# Altium footprint library Amin-Library.PcbLib: 601 footprints (part 21 of 38)
Each footprint in its own frame and in the unit in brackets; x right, y up, seen from the top. Pads: shape width x height; smd on the part's side, far side on the other; paste and mask are expansions set on the pad; w line width, h text height; cw(c..) or ccw(c..) is an arc to the next point about the centre after c.
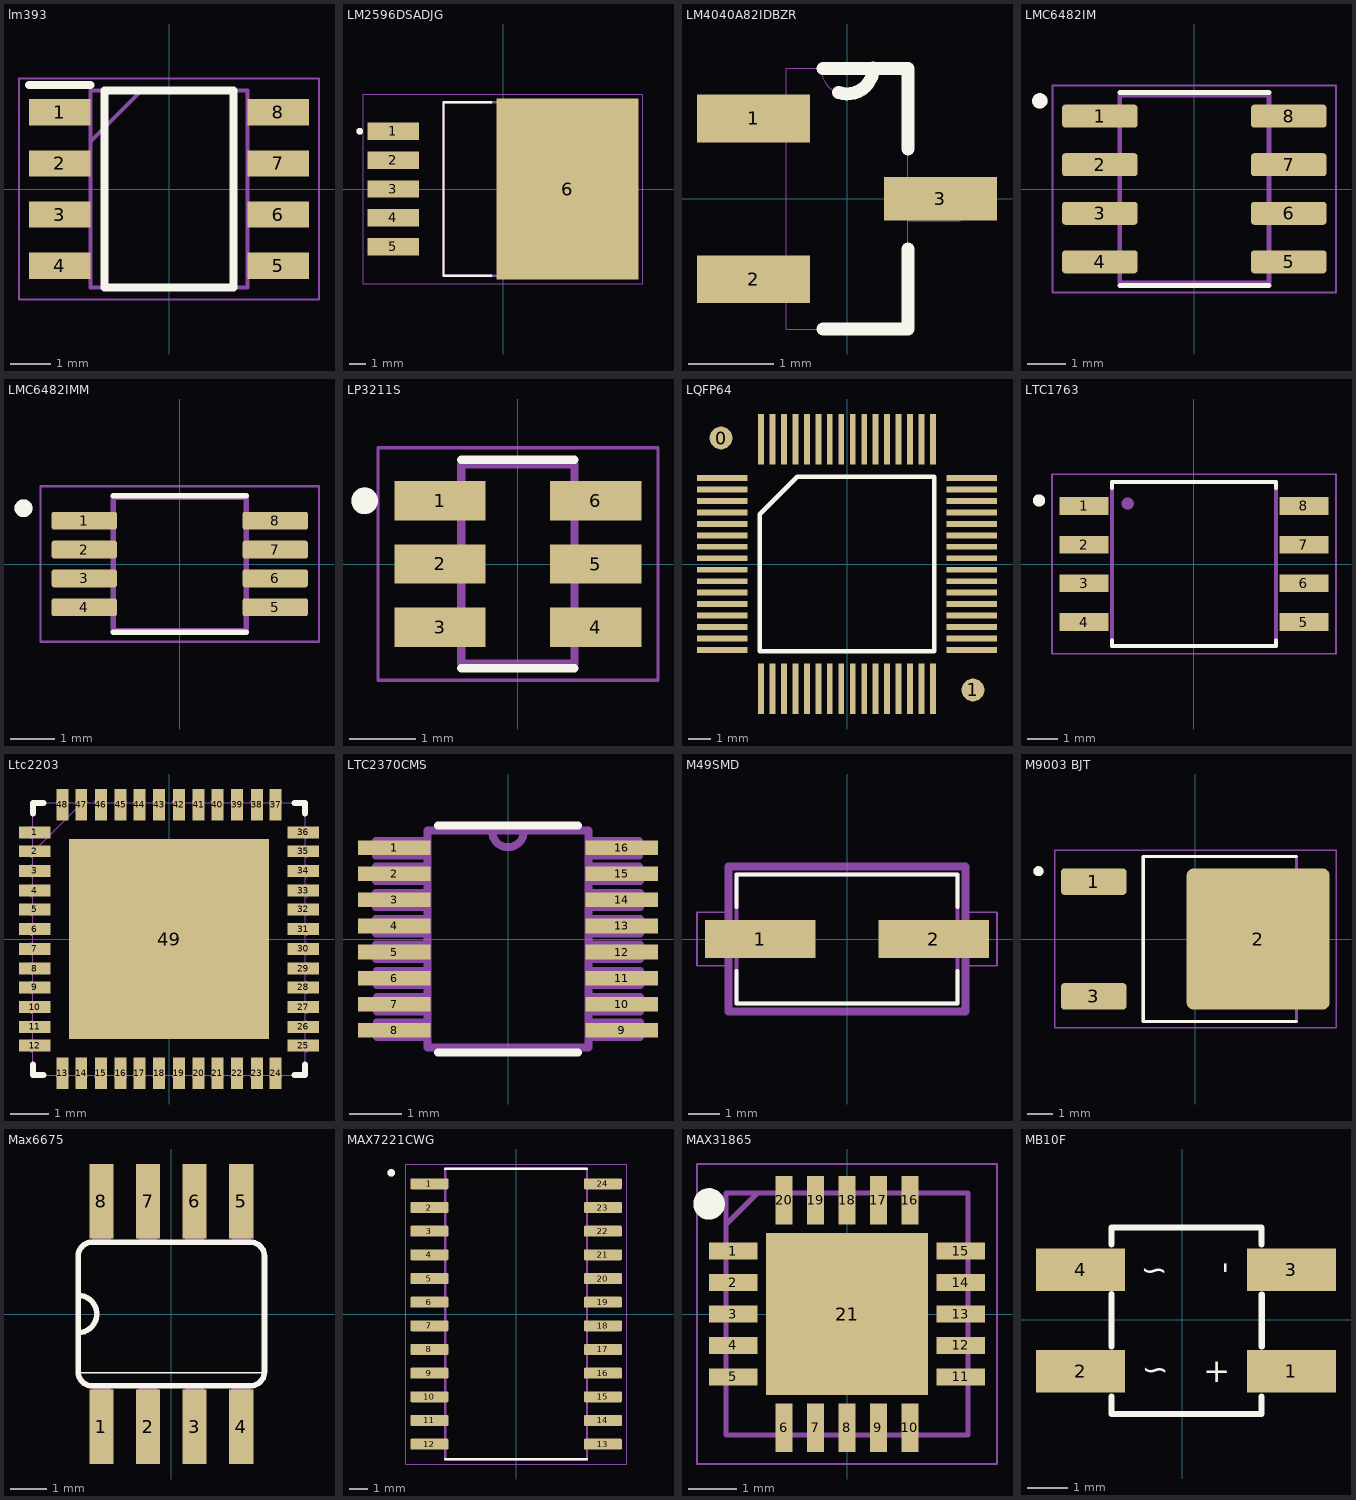
[diagram p20: the footprints below, top view; thin cyan lines are the x and y axes]

## lm393 [mm]
pads (8):
  rect 1.525x0.65 smd: 1(-2.712,1.905) 2(-2.712,0.635) 3(-2.712,-0.635) 4(-2.712,-1.905) 5(2.712,-1.905) 6(2.712,-0.635) 7(2.712,0.635) 8(2.712,1.905)
Top Overlay:
  lines w0.2: -3.475,2.58 -1.95,2.58 ; -1.6,-2.45 1.6,-2.45 1.6,2.45 -1.6,2.45 -1.6,-2.45
Mechanical 13:
  lines w0.1: -1.95,1.18 -0.68,2.45 ; -1.95,-2.45 1.95,-2.45 1.95,2.45 -1.95,2.45 -1.95,-2.45
Mechanical 15:
  lines w0.05: -3.725,-2.75 3.725,-2.75 3.725,2.75 -3.725,2.75 -3.725,-2.75
3D body "LM393ADT.stp": height 1.75, standoff 0, extent -3,-2.45 3,2.45

## LM2596DSADJG [mm] "D2PACK"
pads (6):
  rect 3.05x1.016 smd: 1(-6.485,3.404) 2(-6.485,1.702) 3(-6.485,0) 4(-6.485,-1.702) 5(-6.485,-3.404)
  rect 8.38x10.66 smd paste-4.19: 6(3.82,0)
Top Overlay:
  circle w0.2: c-8.46,3.404 r0.1
  lines w0.127: -0.69,-5.118 -3.517,-5.118 -3.517,5.118 -0.69,5.118
Top Paste:
  region: 5.501,-1.723 7.151,-1.723 7.151,-2.923 5.501,-2.923
  region: 0.489,-1.723 2.139,-1.723 2.139,-2.923 0.489,-2.923
  region: 2.995,-1.723 4.645,-1.723 4.645,-2.923 2.995,-2.923
  region: 5.501,-3.271 7.151,-3.271 7.151,-4.471 5.501,-4.471
  region: 0.489,-3.271 2.139,-3.271 2.139,-4.471 0.489,-4.471
  region: 2.995,-3.271 4.645,-3.271 4.645,-4.471 2.995,-4.471
  region: 5.501,-0.174 7.151,-0.174 7.151,-1.374 5.501,-1.374
  region: 0.489,-0.174 2.139,-0.174 2.139,-1.374 0.489,-1.374
  region: 2.995,-0.174 4.645,-0.174 4.645,-1.374 2.995,-1.374
  region: 5.501,1.374 7.151,1.374 7.151,0.174 5.501,0.174
  region: 0.489,1.374 2.139,1.374 2.139,0.174 0.489,0.174
  region: 2.995,1.374 4.645,1.374 4.645,0.174 2.995,0.174
  region: 5.501,2.923 7.151,2.923 7.151,1.723 5.501,1.723
  region: 0.489,2.923 2.139,2.923 2.139,1.723 0.489,1.723
  region: 2.995,2.923 4.645,2.923 4.645,1.723 2.995,1.723
  region: 5.501,4.471 7.151,4.471 7.151,3.271 5.501,3.271
  region: 0.489,4.471 2.139,4.471 2.139,3.271 0.489,3.271
  region: 2.995,4.471 4.645,4.471 4.645,3.271 2.995,3.271
Mechanical 4:
  circle w0.2: c-8.46,3.404 r0.1
  circle w0.2: c-8.46,3.404 r0.1
  lines w0.127: -3.517,-5.118 5.83,-5.118 ; -3.517,-5.118 -3.517,5.118 ; -3.517,-5.118 5.83,-5.118 ; -3.517,-5.118 -3.517,5.118 ; -3.517,5.118 5.83,5.118 ; -3.517,5.118 5.83,5.118 ; 5.83,-5.118 5.83,5.118 ; 5.83,-5.118 5.83,5.118
Mechanical 16:
  lines w0.05: -8.26,-5.58 8.26,-5.58 8.26,5.58 -8.26,5.58 -8.26,-5.58
3D body "User Library-TO-263 5Ld.step": height 4.57, standoff -0.01, extent -7.701,-5.08 6.939,5.08

## LM4040A82IDBZR [mil]
pads (3):
  rect 52x22 smd: 1(-43,37) 2(-43,-37)
  rect 52x20 smd: 3(43,0)
Top Overlay:
  lines w6: -11,-60 28,-60 28,-23 ; -11,60 12,60 28,60 28,23 ; -3.9,48.96 ccw(c0.15,60.1) 12,60.1
Mechanical 1:
  lines w0: -28,-47 -52,-47 -52,-28 -28,-28 ; -28,-47 -28,-28 ; -28,-47 -28,-60 28,-60 28,-10 ; -28,-28 -28,28 ; -28,28 -52,28 -52,47 -28,47 ; -28,28 -28,47 ; -28,47 -28,60 -12,60 ; -12,60 ccw(c0,60) 12,60 ; -12,60 12,60 ; 12,60 28,60 28,10 ; 28,-10 52,-10 52,10 28,10 ; 28,-10 28,10

## LMC6482IM [mm]
pads (8):
  rrect25% 1.97x0.6 smd: 1(-2.47,1.905) 2(-2.47,0.635) 3(-2.47,-0.635) 4(-2.47,-1.905) 5(2.47,-1.905) 6(2.47,-0.635) 7(2.47,0.635) 8(2.47,1.905)
Top Overlay:
  circle w0.2: c-4.04,2.305 r0.1
  lines w0.127: -1.95,-2.525 1.95,-2.525 ; -1.95,2.525 1.95,2.525
Mechanical 13:
  circle w0.2: c-4.04,2.305 r0.1
  lines w0.127: -1.95,-2.452 1.95,-2.452 1.95,2.452 -1.95,2.452 -1.95,-2.452
Mechanical 15:
  lines w0.05: -3.705,-2.702 3.705,-2.702 3.705,2.702 -3.705,2.702 -3.705,-2.702
3D body "step_temp.STEP": height 1.75, standoff 0, extent -2.997,-2.451 2.997,2.451

## LMC6482IMM [mm]
pads (8):
  rrect25% 1.47x0.4 smd: 1(-2.15,0.975) 2(-2.15,0.325) 3(-2.15,-0.325) 4(-2.15,-0.975) 5(2.15,-0.975) 6(2.15,-0.325) 7(2.15,0.325) 8(2.15,0.975)
Top Overlay:
  circle w0.2: c-3.52,1.255 r0.1
  lines w0.127: -1.5,-1.535 1.5,-1.535 ; -1.5,1.535 1.5,1.535
Mechanical 13:
  circle w0.2: c-3.52,1.255 r0.1
  lines w0.127: -1.5,-1.5 1.5,-1.5 1.5,1.5 -1.5,1.5 -1.5,-1.5
Mechanical 15:
  lines w0.05: -3.135,-1.75 3.135,-1.75 3.135,1.75 -3.135,1.75 -3.135,-1.75
3D body "step_temp.STEP": height 1.1, standoff 0, extent -2.45,-1.5 2.45,1.5

## LP3211S [mm]
pads (6):
  rect 1.37x0.59 smd: 1(-1.17,0.95) 2(-1.17,0) 3(-1.17,-0.95) 4(1.17,-0.95) 5(1.17,0) 6(1.17,0.95)
Top Overlay:
  circle w0.2: c-2.305,0.95 r0.1
  lines w0.127: -0.85,-1.565 0.85,-1.565 ; -0.85,1.565 0.85,1.565
Mechanical 4:
  circle w0.2: c-2.305,0.95 r0.1
  circle w0.2: c-2.305,0.95 r0.1
  lines w0.127: -0.85,-1.5 0.85,-1.5 ; -0.85,-1.5 -0.85,1.5 ; -0.85,-1.5 0.85,-1.5 ; -0.85,-1.5 -0.85,1.5 ; -0.85,1.5 0.85,1.5 ; -0.85,1.5 0.85,1.5 ; 0.85,-1.5 0.85,1.5 ; 0.85,-1.5 0.85,1.5
Mechanical 16:
  lines w0.05: -2.105,-1.75 2.105,-1.75 2.105,1.75 -2.105,1.75 -2.105,-1.75
3D body "MT3608--3DModel-STEP-56544.STEP": height 1.45, standoff 0, extent -1.4,-1.45 1.4,1.45

## LQFP64 [mm]
pads (66):
  round 1 smd: 0(-5.5,5.5) 1(5.5,-5.5)
  rect 2.2x0.254 smd: 1(-5.45,3.75) 2(-5.45,3.25) 3(-5.45,2.75) 4(-5.45,2.25) 5(-5.45,1.75) 6(-5.45,1.25) 7(-5.45,0.75) 8(-5.45,0.25) 9(-5.45,-0.25) 10(-5.45,-0.75) 11(-5.45,-1.25) 12(-5.45,-1.75) 13(-5.45,-2.25) 14(-5.45,-2.75) 15(-5.45,-3.25) 16(-5.45,-3.75) 33(5.45,-3.75) 34(5.45,-3.25) 35(5.45,-2.75) 36(5.45,-2.25) 37(5.45,-1.75) 38(5.45,-1.25) 39(5.45,-0.75) 40(5.45,-0.25) 41(5.45,0.25) 42(5.45,0.75) 43(5.45,1.25) 44(5.45,1.75) 45(5.45,2.25) 46(5.45,2.75) 47(5.45,3.25) 48(5.45,3.75)
  rect 0.254x2.2 smd: 17(-3.75,-5.45) 18(-3.25,-5.45) 19(-2.75,-5.45) 20(-2.25,-5.45) 21(-1.75,-5.45) 22(-1.25,-5.45) 23(-0.75,-5.45) 24(-0.25,-5.45) 25(0.25,-5.45) 26(0.75,-5.45) 27(1.25,-5.45) 28(1.75,-5.45) 29(2.25,-5.45) 30(2.75,-5.45) 31(3.25,-5.45) 32(3.75,-5.45) 49(3.75,5.45) 50(3.25,5.45) 51(2.75,5.45) 52(2.25,5.45) 53(1.75,5.45) 54(1.25,5.45) 55(0.75,5.45) 56(0.25,5.45) 57(-0.25,5.45) 58(-0.75,5.45) 59(-1.25,5.45) 60(-1.75,5.45) 61(-2.25,5.45) 62(-2.75,5.45) 63(-3.25,5.45) 64(-3.75,5.45)
Top Overlay:
  lines w0.2: -3.815,-3.815 3.815,-3.815 3.815,3.815 -2.18,3.815 -3.815,2.18 -3.815,-3.815

## LTC1763 [mm]
pads (8):
  rect 1.61x0.58 smd: 1(-3.605,1.905) 2(-3.605,0.635) 3(-3.605,-0.635) 4(-3.605,-1.905) 5(3.605,-1.905) 6(3.605,-0.635) 7(3.605,0.635) 8(3.605,1.905)
Top Overlay:
  circle w0.2: c-5.085,2.085 r0.1
  lines w0.127: -2.69,-2.51 -2.69,-2.69 2.69,-2.69 2.69,-2.51 ; -2.69,2.5 -2.69,2.69 2.69,2.69 2.69,2.5
Mechanical 4:
  circle w0.2: c-2.175,1.985 r0.1
  circle w0.2: c-2.175,1.985 r0.1
  lines w0.127: -2.69,-2.69 2.69,-2.69 ; -2.69,-2.69 -2.69,2.69 ; -2.69,-2.69 2.69,-2.69 ; -2.69,-2.69 -2.69,2.69 ; -2.69,2.69 2.69,2.69 ; -2.69,2.69 2.69,2.69 ; 2.69,-2.69 2.69,2.69 ; 2.69,-2.69 2.69,2.69
Mechanical 16:
  lines w0.05: -4.66,-2.94 4.66,-2.94 4.66,2.94 -4.66,2.94 -4.66,-2.94
3D body "User Library-so8-3.STEP": height 1.7, standoff 0, extent -3,-2.45 3,2.45

## Ltc2203 [mil]
pads (49):
  rect 32x12 smd: 1(-136,108) 2(-136,89) 3(-136,69) 4(-136,49) 5(-136,30) 6(-136,10) 7(-136,-10) 8(-136,-30) 9(-136,-49) 10(-136,-69) 11(-136,-89) 12(-136,-108) 25(136,-108) 26(136,-89) 27(136,-69) 28(136,-49) 29(136,-30) 30(136,-10) 31(136,10) 32(136,30) 33(136,49) 34(136,69) 35(136,89) 36(136,108)
  rect 12x32 smd: 13(-108,-136) 14(-89,-136) 15(-69,-136) 16(-49,-136) 17(-30,-136) 18(-10,-136) 19(10,-136) 20(30,-136) 21(49,-136) 22(69,-136) 23(89,-136) 24(108,-136) 37(108,136) 38(89,136) 39(69,136) 40(49,136) 41(30,136) 42(10,136) 43(-10,136) 44(-30,136) 45(-49,136) 46(-69,136) 47(-89,136) 48(-108,136)
  rect 203x203 smd: 49(0,0)
Top Overlay:
  lines w6: -138,-127 -138,-138 -127,-138 ; -138,127 -138,138 -127,138 ; 127,-138 138,-138 138,-127 ; 127,138 138,138 138,127
Mechanical 4:
  drawing of 394 lines, arcs and shapes, not listed
3D body "User Library-QFN48-2.STEP": height 35.43, standoff 0, extent -138.78,-138.78 138.78,138.79

## LTC2370CMS [mil]
pads (16):
  rect 55x11 smd: 1(-86,68.95) 2(-86,49.25) 3(-86,29.55) 4(-86,9.85) 5(-86,-9.85) 6(-86,-29.55) 7(-86,-49.25) 8(-86,-68.95) 9(86,-68.95) 10(86,-49.25) 11(86,-29.55) 12(86,-9.85) 13(86,9.85) 14(86,29.55) 15(86,49.25) 16(86,68.95)
Top Overlay:
  lines w6: -53,-86 53,-86 ; -53,86 53,86
Mechanical 1:
  lines w6: -12,81.08 ccw(c0,81.5) 12,81.92 ; -100,-15 -100,-4 -61,-4 -61,-15 -100,-15 ; -100,4 -100,15 -61,15 -61,4 -100,4 ; -100,24 -100,35 -61,35 -61,24 -100,24 ; -100,44 -100,55 -61,55 -61,44 -100,44 ; -100,63 -100,74 -61,74 -61,63 -100,63 ; -99,-74 -99,-63 -61,-63 -61,-74 -99,-74 ; -99,-55 -99,-44 -61,-44 -61,-55 -99,-55 ; -99,-35 -99,-24 -61,-24 -61,-35 -99,-35 ; -61,-82 61,-82 61,82 12,82 -61,82 -61,-82 ; 61,-74 61,-63 100,-63 100,-74 61,-74 ; 61,-55 61,-44 100,-44 100,-55 61,-55 ; 61,-35 61,-24 100,-24 100,-35 61,-35 ; 61,-15 61,-4 100,-4 100,-15 61,-15 ; 61,4 61,15 100,15 100,4 61,4 ; 61,24 61,35 100,35 100,24 61,24 ; 61,44 61,55 99,55 100,44 61,44 ; 61,63 61,74 99,74 99,63 61,63

## M49SMD [mm] "M49SMD-24MHz-12pf-10ppm 4*7mm"
pads (2):
  rect 3.5x1.2 smd: 1(-2.75,0) 2(2.75,0)
Top Overlay:
  lines w0.127: -3.5,-1.01 -3.5,-2.05 3.5,-2.05 3.5,-1.01 ; -3.5,1.01 -3.5,2.05 3.5,2.05 3.5,1.01
Top Courtyard:
  lines w0.254: -3.75,-2.3 3.75,-2.3 3.75,2.3 -3.75,2.3 -3.75,-2.3
Mechanical 13:
  lines w0.127: -3.5,-2.05 3.5,-2.05 3.5,2.05 -3.5,2.05 -3.5,-2.05
Mechanical 15:
  lines w0.05: -4.75,-0.85 -3.75,-0.85 -3.75,-2.3 3.75,-2.3 3.75,-0.85 4.75,-0.85 4.75,0.85 3.75,0.85 3.75,2.3 -3.75,2.3 -3.75,0.85 -4.75,0.85 -4.75,-0.85
3D body "step_temp.STEP": height 2.3, standoff 0, extent -3.8,-2.05 3.8,2.05

## M9003 BJT [mm] "TO255-DPACK"
height 2.39
pads (3):
  rrect25% 2.6x1.06 smd: 1(-4.05,2.286) 3(-4.05,-2.286)
  rrect10% 5.7x5.632 smd paste-4: 2(2.5,0)
Top Overlay:
  circle w0.2: c-6.25,2.7 r0.1
  lines w0.127: 4.025,-3.29 -2.075,-3.29 -2.075,3.29 4.025,3.29
Top Paste:
  region: 3.175,-0.66 1.825,-0.66 1.825,0.66 3.175,0.66
  region: 1.275,-0.66 -0.075,-0.66 -0.075,0.66 1.275,0.66
  region: 5.075,-0.66 3.725,-0.66 3.725,0.66 5.075,0.66
  region: 3.175,1.21 1.825,1.21 1.825,2.53 3.175,2.53
  region: 1.275,1.21 -0.075,1.21 -0.075,2.53 1.275,2.53
  region: 5.075,1.21 3.725,1.21 3.725,2.53 5.075,2.53
  region: 3.175,-2.53 1.825,-2.53 1.825,-1.21 3.175,-1.21
  region: 1.275,-2.53 -0.075,-2.53 -0.075,-1.21 1.275,-1.21
  region: 5.075,-2.53 3.725,-2.53 3.725,-1.21 5.075,-1.21
Mechanical 13:
  circle w0.2: c-6.25,2.7 r0.1
  lines w0.127: -2.075,-3.29 -2.075,3.29 4.025,3.29 4.025,-3.29 -2.075,-3.29
Mechanical 15:
  lines w0.05: -5.6,-3.54 -5.6,3.54 5.6,3.54 5.6,-3.54 -5.6,-3.54
3D body "2SC2983.STEP": height 2.3, standoff -0.08, extent -4.976,-3.3 4.775,3.3

## Max6675 [mil]
pads (8):
  rect 26x80 smd: 1(-75,-121) 2(-25,-121) 3(25,-121) 4(75,-121) 5(75,121) 6(25,121) 7(-25,121) 8(-75,121)
Top Overlay:
  lines w2: -100,-63 100,-63
  lines w6: -100,-20 ccw(c-100,0) -100,20 ; -100,-62 ccw(c-85,-62) -85,-77 85,-77 ccw(c85,-62) 100,-62 100,62 ccw(c85,62) 85,77 -85,77 ccw(c-85,62) -100,62 -100,-62
Mechanical 13:
  region: -65,77 -85,77 -85,122 -65,122
  region: -15,77 -35,77 -35,122 -15,122
  region: 35,77 15,77 15,122 35,122
  region: 85,-122 65,-122 65,-77 85,-77
  region: 35,-121 15,-121 15,-76 35,-76
  region: -15,-122 -35,-122 -35,-77 -15,-77
  region: -65,-122 -85,-122 -85,-77 -65,-77
  region: 85,77 65,77 65,122 85,122
3D body "User Library-so8-3.STEP": height 66.93, standoff 0, extent -96.46,-118.1 96.45,118.12

## MAX7221CWG [mm] "SOIC127P1032X265-24N"
pads (24):
  rrect25% 2.05x0.59 smd: 1(-4.655,6.985) 2(-4.655,5.715) 3(-4.655,4.445) 4(-4.655,3.175) 5(-4.655,1.905) 6(-4.655,0.635) 7(-4.655,-0.635) 8(-4.655,-1.905) 9(-4.655,-3.175) 10(-4.655,-4.445) 11(-4.655,-5.715) 12(-4.655,-6.985) 13(4.655,-6.985) 14(4.655,-5.715) 15(4.655,-4.445) 16(4.655,-3.175) 17(4.655,-1.905) 18(4.655,-0.635) 19(4.655,0.635) 20(4.655,1.905) 21(4.655,3.175) 22(4.655,4.445) 23(4.655,5.715) 24(4.655,6.985)
Top Overlay:
  circle w0.2: c-6.705,7.575 r0.1
  lines w0.127: -3.8,-7.8 3.8,-7.8 ; -3.8,7.8 3.8,7.8
Mechanical 13:
  circle w0.2: c-6.705,7.575 r0.1
  lines w0.127: -3.8,-7.8 3.8,-7.8 3.8,7.8 -3.8,7.8 -3.8,-7.8
Mechanical 15:
  lines w0.05: -5.93,-8.05 5.93,-8.05 5.93,8.05 -5.93,8.05 -5.93,-8.05
3D body "MAX7221CWG+T.STEP": height 2.65, standoff 0, extent -5.162,-7.7 5.162,7.7

## MAX31865 [mm]
pads (21):
  rect 1x0.35 smd: 1(-2.35,1.3) 2(-2.35,0.65) 3(-2.35,0) 4(-2.35,-0.65) 5(-2.35,-1.3) 11(2.35,-1.3) 12(2.35,-0.65) 13(2.35,0) 14(2.35,0.65) 15(2.35,1.3)
  rect 0.35x1 smd: 6(-1.3,-2.35) 7(-0.65,-2.35) 8(0,-2.35) 9(0.65,-2.35) 10(1.3,-2.35) 16(1.3,2.35) 17(0.65,2.35) 18(0,2.35) 19(-0.65,2.35) 20(-1.3,2.35)
  rect 3.35x3.35 smd: 21(0,0)
Top Overlay:
  circle w0.325: c-2.85,2.275 r0.162
Mechanical 13:
  lines w0.1: -2.5,1.85 -1.85,2.5 ; -2.5,-2.5 -2.5,2.5 2.5,2.5 2.5,-2.5 -2.5,-2.5
Mechanical 15:
  lines w0.05: -3.1,-3.1 -3.1,3.1 3.1,3.1 3.1,-3.1 -3.1,-3.1
3D body "MAX31865ATP+.stp": height 0.8, standoff 0, extent -2.55,-2.55 2.55,2.55

## MB10F [mm] "BRIDGE RECTIFIER"
height 1.91
pads (4):
  rect 2.2x1.05 smd: 1(2.687,-1.27) 2(-2.513,-1.27) 3(2.687,1.23) 4(-2.513,1.23)
Top Overlay:
  lines w0.152: -1.75,-1.901 -1.75,-2.323 1.95,-2.323 1.95,-1.901 ; -1.75,-0.66 -1.75,0.635 ; -1.75,1.854 -1.75,2.277 1.95,2.277 1.95,1.854 ; 1.955,-0.662 1.955,0.625
  text "~" at -1.028,1.65 h1
  text "~" at -1.003,-0.805 h1
  text "+" at 0.507,-0.84 h1
  text "-" at 0.652,1.13 h1
3D body "User Library-MB10F TMBS-1.step": height 1.61, standoff 0, extent -3.4,-2.45 3.4,2.45